# EAGLE library part NE555P (library NE555P)
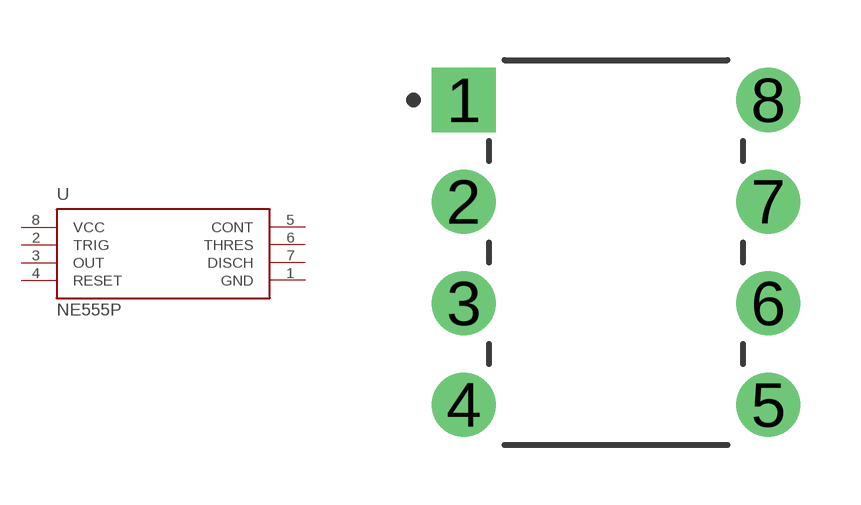
[diagram p0: symbol with the pads of C46749_DIP-8; footprint C46749_DIP-8]

Designator prefix U

## NE555P  [C46749_DIP-8]
1  GND  pwr
2  TRIG
3  OUT  out
4  RESET  in
5  CONT
6  THRES
7  DISCH  oc
8  VCC  pwr

## Footprint C46749_DIP-8 (pad centres in mm)
NE555P — Clean-Room IPC-2221 / JEDEC MS-001 (PDIP-8)
drill 0.85 pad 1.6 square: 1 -3.81,3.81
drill 0.85 pad 1.6 round: 2 -3.81,1.27; 3 -3.81,-1.27; 4 -3.81,-3.81; 5 3.81,-3.81; 6 3.81,-1.27; 7 3.81,1.27; 8 3.81,3.81